# EAGLE library part VL53L1CXV0FY_1 (library VL53L1CXV0FY_1)
A new generation, long distance ranging Time-of-Flight sensor based on ST's FlightSense technology Source: Datasheet <https://www.st.com/resource/en/datasheet/vl53l1x.pdf>
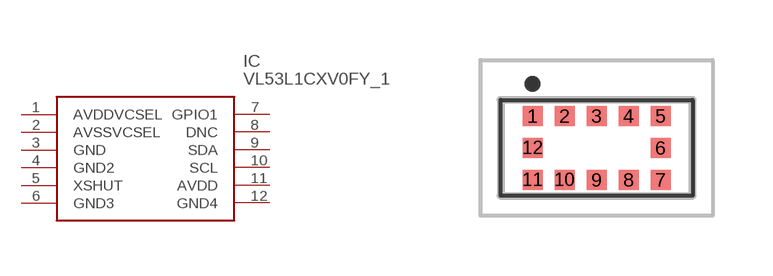
[diagram p0: symbol with the pads of VL53L1CXV0FY1; footprint VL53L1CXV0FY1]

Designator prefix IC

## VL53L1CXV0FY_1 (Arrow_Part_Number: VL53L1CXV0FY/1; Arrow_Price-Stock: https://www.arrow.com/en/products/vl53l1cxv0fy1/stmicroelectronics.html?utm_currency=USD&region=nac; Description: A new generation, long distance ranging Time-of-Flight sensor based on ST's FlightSense technology; Height: 1mm; Manufacturer_Name: STMicroelectronics; Manufacturer_Part_Number: VL53L1CXV0FY/1; Mouser_Part_Number: 511-VL53L1CXV0FY/1; Mouser_Price-Stock: https://www.mouser.co.uk/ProductDetail/STMicroelectronics/VL53L1CXV0FY-1?qs=W0yvOO0ixfFQE5v5L6h6PA%3D%3D)  [VL53L1CXV0FY1]
1  AVDDVCSEL
2  AVSSVCSEL
3  GND
4  GND2
5  XSHUT
6  GND3
7  GPIO1
8  DNC
9  SDA
10  SCL
11  AVDD
12  GND4

## Footprint VL53L1CXV0FY1 (pad centres in mm)
VL53L1CXV0FY/1
smd 0.5 x 0.5: 1 -1.6,0.8; 2 -0.8,0.8; 3 0,0.8; 4 0.8,0.8; 5 1.6,0.8; 6 1.6,0; 7 1.6,-0.8; 8 0.8,-0.8; 9 0,-0.8; 10 -0.8,-0.8; 11 -1.6,-0.8; 12 -1.6,0